# Altium footprint library Amin-Library.PcbLib: 601 footprints (part 30 of 38)
Each footprint in its own frame and in the unit in brackets; x right, y up, seen from the top. Pads: shape width x height; smd on the part's side, far side on the other; paste and mask are expansions set on the pad; w line width, h text height; cw(c..) or ccw(c..) is an arc to the next point about the centre after c.
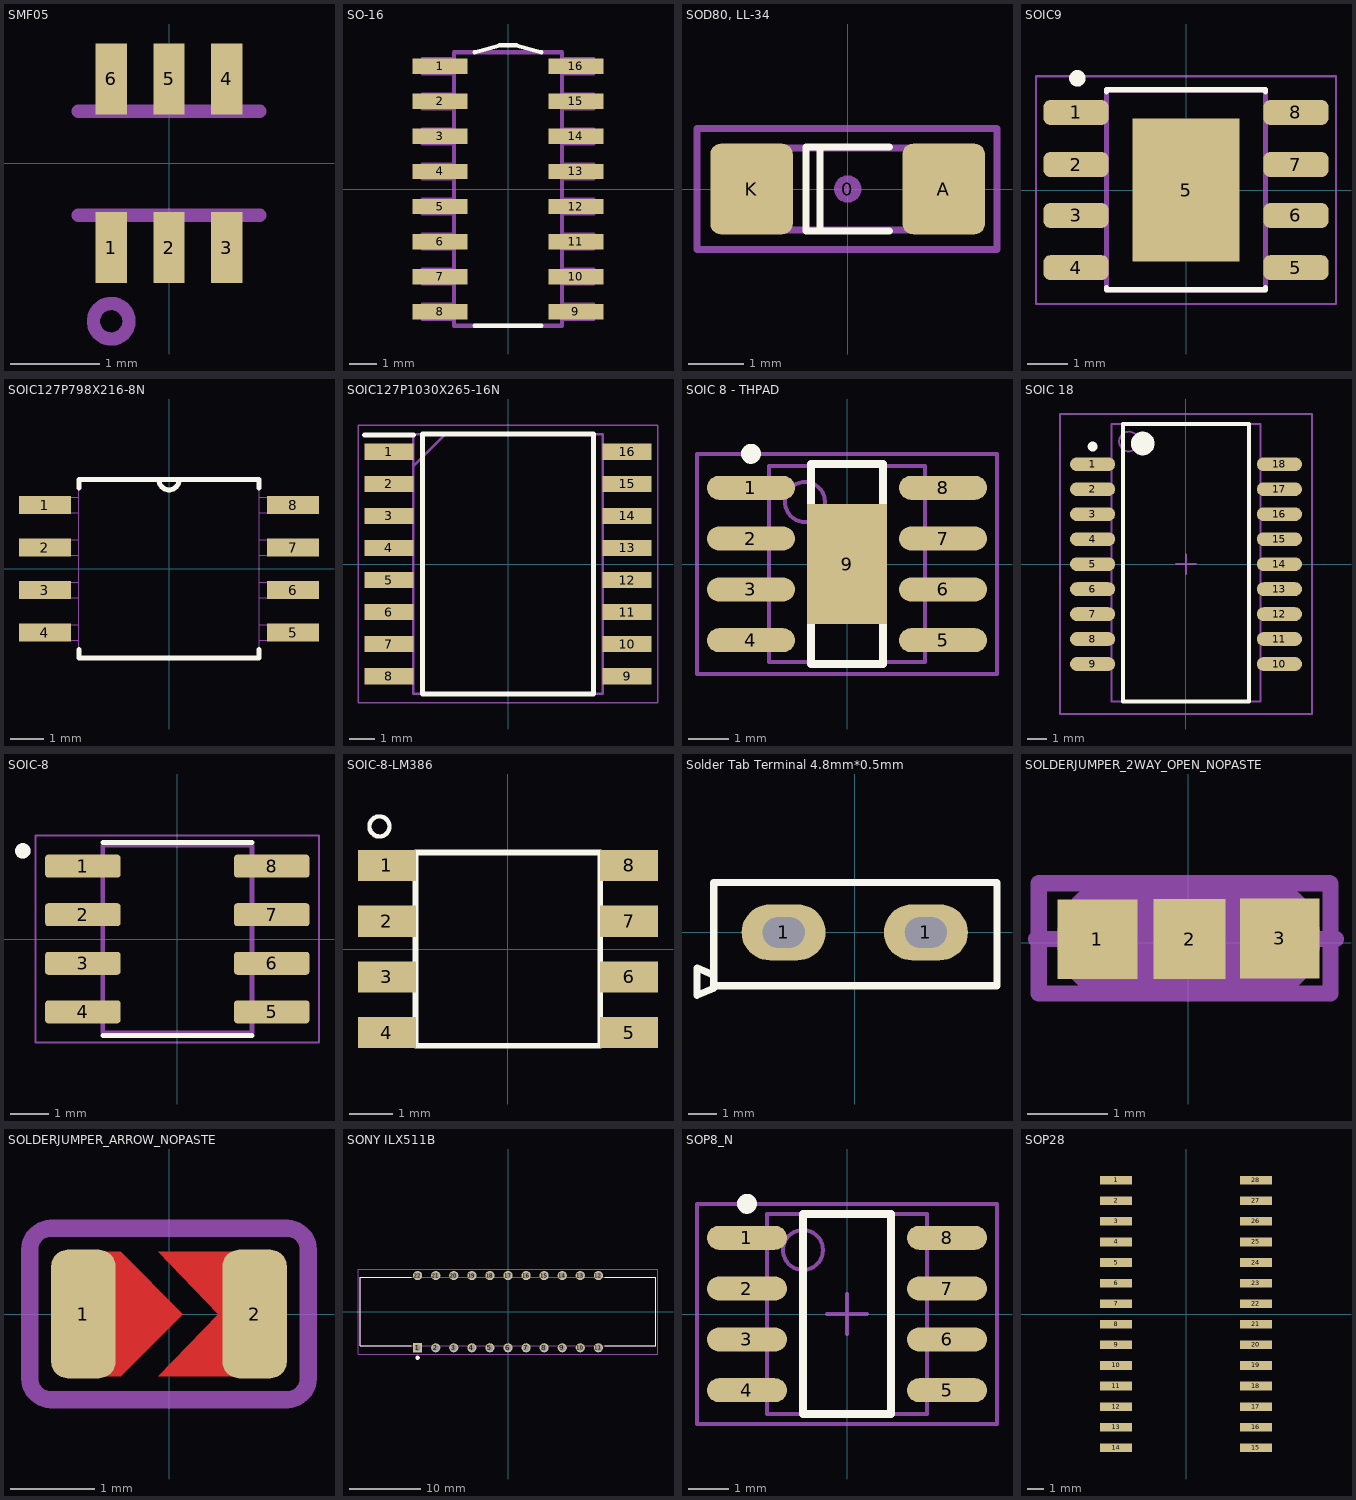
[diagram p29: the footprints below, top view; thin cyan lines are the x and y axes]

## SMF05 [mm]
pads (6):
  rect 0.35x0.8 smd: 1(-0.65,-0.95) 2(0,-0.95) 3(0.65,-0.95) 4(0.65,0.95) 5(0,0.95) 6(-0.65,0.95)
Top Paste:
  region: -0.802,1.325 -0.5,1.325 -0.5,0.576 -0.802,0.576
  region: -0.15,1.325 0.15,1.325 0.15,0.575 -0.15,0.575
  region: 0.5,1.325 0.8,1.325 0.8,0.575 0.5,0.575
  region: 0.5,-0.575 0.8,-0.575 0.8,-1.326 0.5,-1.326
  region: -0.15,-0.575 0.15,-0.575 0.15,-1.326 -0.15,-1.326
  region: -0.801,-0.575 -0.5,-0.575 -0.5,-1.326 -0.801,-1.326
Top Solder:
  region: -0.875,1.4 -0.425,1.4 -0.425,0.5 -0.875,0.5
  region: -0.225,1.4 0.225,1.4 0.225,0.501 -0.225,0.501
  region: 0.425,1.4 0.875,1.4 0.875,0.5 0.425,0.5
  region: 0.426,-0.5 0.875,-0.5 0.875,-1.402 0.426,-1.402
  region: -0.225,-0.5 0.225,-0.5 0.225,-1.401 -0.225,-1.401
  region: -0.875,-0.5 -0.425,-0.5 -0.425,-1.401 -0.875,-1.401
Mechanical 3:
  circle w0.15: c-0.651,-1.778 r0.2
Mechanical 4:
  region: -0.801,1.2 -0.5,1.2 -0.5,0.626 -0.801,0.626
  region: -0.15,1.2 0.15,1.2 0.15,0.626 -0.15,0.626
  region: 0.501,1.2 0.8,1.2 0.8,0.626 0.501,0.626
  region: 0.5,-0.625 0.8,-0.625 0.8,-1.201 0.5,-1.201
  region: -0.801,-0.625 -0.5,-0.625 -0.5,-1.202 -0.801,-1.202
  region: -0.15,-0.625 0.15,-0.625 0.15,-1.2 -0.15,-1.2
  region: -0.801,1.2 -0.5,1.2 -0.5,0.626 -0.801,0.626
  region: -0.15,1.2 0.15,1.2 0.15,0.626 -0.15,0.626
  region: 0.501,1.2 0.8,1.2 0.8,0.626 0.501,0.626
  region: 0.5,-0.625 0.8,-0.625 0.8,-1.201 0.5,-1.201
  region: -0.801,-0.625 -0.5,-0.625 -0.5,-1.202 -0.801,-1.202
  region: -0.15,-0.625 0.15,-0.625 0.15,-1.2 -0.15,-1.2
  lines w0.152: -1.022,-0.585 1.022,-0.585 -1.022,-0.585 ; -1.022,0.585 1.022,0.585 -1.022,0.585
3D body "User Library-SOT363-2.step": height 1.1, standoff 0, extent -1.1,-1.2 1.1,1.2

## SO-16 [mil]
height 629.92
pads (16):
  rect 78x22 smd: 1(-97,175) 2(-97,125) 3(-97,75) 4(-97,25) 5(-97,-25) 6(-97,-75) 7(-97,-125) 8(-97,-175) 9(97,-175) 10(97,-125) 11(97,-75) 12(97,-25) 13(97,25) 14(97,75) 15(97,125) 16(97,175)
Top Overlay:
  lines w6: -48,-195 48,-195 ; -48,195 -12,205 12,205 48,195
Mechanical 13:
  lines w6: -122,-185 -77,-185 -77,-165 -122,-165 -122,-185 ; -122,-135 -77,-135 -77,-115 -122,-115 -122,-135 ; -122,-85 -77,-85 -77,-65 -122,-65 -122,-85 ; -122,-35 -77,-35 -77,-15 -122,-15 -122,-35 ; -122,15 -77,15 -77,35 -122,35 -122,15 ; -122,65 -77,65 -77,85 -122,85 -122,65 ; -122,115 -77,115 -77,135 -122,135 -122,115 ; -122,165 -77,165 -77,185 -122,185 -122,165 ; -77,-195 -77,195 -12,195 12,195 77,195 77,-195 -77,-195 ; 77,-185 122,-185 122,-165 77,-165 77,-185 ; 77,-135 122,-135 122,-115 77,-115 77,-135 ; 77,-85 122,-85 122,-65 77,-65 77,-85 ; 77,-35 122,-35 122,-15 77,-15 77,-35 ; 77,15 122,15 122,35 77,35 77,15 ; 77,65 122,65 122,85 77,85 77,65 ; 77,115 122,115 122,135 77,135 77,115 ; 77,165 122,165 122,185 77,185 77,165

## SOD80, LL-34 [mm] "Diode, MiniMELF"
height 1.6
pads (3):
  round 0.5 on Mech15: 0(0,0)
  rrect25% 1.5x1.65 smd paste+0.2: A(1.75,0) K(-1.75,0)
Top Overlay:
  lines w0.127: -0.508,-0.762 -0.508,0.762 ; 0.762,-0.762 -0.762,-0.762 -0.762,0.762 0.762,0.762
Mechanical 13:
  lines w0.127: -1.8,-0.747 -1.8,0.747 1.8,0.747 1.8,-0.747 -1.8,-0.747
Mechanical 15:
  lines w0.127: -2.743,-1.1 -2.743,1.1 2.718,1.1 2.718,-1.1 -2.743,-1.1
3D body "SOD80.stp": height 1.47, standoff -0.01, extent -1.8,-0.747 1.8,0.747

## SOIC9 [mm]
pads (9):
  rrect54% 1.6x0.61 smd: 1(-2.7,1.905) 2(-2.7,0.625) 3(-2.7,-0.625) 4(-2.7,-1.905) 5(2.7,-1.905) 6(2.7,-0.625) 7(2.7,0.625) 8(2.7,1.905)
  rect 2.62x3.51 smd: 5(0,0)
Top Overlay:
  circle w0.203: c-2.667,2.743 r0.102
  lines w0.127: -1.95,-2.4 -1.95,-2.45 1.956,-2.45 1.956,-2.4 ; -1.95,2.413 -1.95,2.464 1.956,2.464 1.956,2.413
Top Paste:
  rectangle: 0.152,0.152 0.94,1.397
  rectangle: 0.152,-1.375 0.94,-0.135
  region: -0.135,-0.135 -0.935,-0.135 -0.935,-1.375 -0.135,-1.375
  region: -0.135,1.397 -0.935,1.397 -0.935,0.152 -0.135,0.152
Mechanical 4:
Mechanical 16:
  lines w0.127: -1.95,-2.45 1.956,-2.45 1.956,2.464 -1.95,2.464 -1.95,-2.45
Mechanical 27:
  lines w0.051: -3.683,-2.794 3.683,-2.794 3.683,2.794 -3.683,2.794 -3.683,-2.794

## SOIC127P798X216-8N [mil]
pads (8):
  rect 61x21 smd: 1(-146,75) 2(-146,25) 3(-146,-25) 4(-146,-75) 5(146,-75) 6(146,-25) 7(146,25) 8(146,75)
Top Overlay:
  lines w6: -106,-95 -106,-105 106,-105 106,-95 ; -106,95 -106,105 -12,105 ; 106,95 106,105 12,105 ; -12,105 ccw(c0,105) 12,105 ; -12,105 ccw(c0,105) 12,105 ; -12,105 12,105
Top Assembly:
Mechanical 16:
  lines w0: -12,105 ccw(c0,105) 12,105 ; -12,105 ccw(c0,105) 12,105 ; -12,105 -106,105 -106,-105 106,-105 106,105 12,105 ; -12,105 12,105 ; -163,-84 -106,-84 -106,-66 -163,-66 -163,-84 ; -163,-34 -106,-34 -106,-16 -163,-16 -163,-34 ; -163,16 -106,16 -106,34 -163,34 -163,16 ; -163,66 -106,66 -106,84 -163,84 -163,66 ; 106,-84 163,-84 163,-66 106,-66 106,-84 ; 106,-34 163,-34 163,-16 106,-16 106,-34 ; 106,16 163,16 163,34 106,34 106,16 ; 106,66 163,66 163,84 106,84 106,66

## SOIC127P1030X265-16N [mm]
pads (16):
  rect 1.95x0.65 smd: 1(-4.725,4.445) 2(-4.725,3.175) 3(-4.725,1.905) 4(-4.725,0.635) 5(-4.725,-0.635) 6(-4.725,-1.905) 7(-4.725,-3.175) 8(-4.725,-4.445) 9(4.725,-4.445) 10(4.725,-3.175) 11(4.725,-1.905) 12(4.725,-0.635) 13(4.725,0.635) 14(4.725,1.905) 15(4.725,3.175) 16(4.725,4.445)
Top Overlay:
  lines w0.2: -5.7,5.12 -3.75,5.12 ; -3.4,-5.15 3.4,-5.15 3.4,5.15 -3.4,5.15 -3.4,-5.15
Mechanical 15:
  lines w0.1: -3.75,3.88 -2.48,5.15 ; -3.75,-5.15 3.75,-5.15 3.75,5.15 -3.75,5.15 -3.75,-5.15
Mechanical 20:
  lines w0.05: -5.95,-5.5 5.95,-5.5 5.95,5.5 -5.95,5.5 -5.95,-5.5
3D body "SOIC-16.stp": height 2.59, standoff 0, extent -5.167,-5.15 5.168,5.15

## SOIC 8 - THPAD [mm] "8-Pin Small Outline Integrated Circuit 1.27 mm Pitch, IPC Medium Density"
height 1.73
pads (9):
  oval 2.2x0.6 smd: 1(-2.4,1.905) 2(-2.4,0.635) 3(-2.4,-0.635) 4(-2.4,-1.905) 5(2.4,-1.905) 6(2.4,-0.635) 7(2.4,0.635) 8(2.4,1.905)
  rect 2x3 smd: 9(0,0)
Top Overlay:
  circle w0.25: c-2.4,2.755 r0.125
  lines w0.2: -0.9,-2.5 0.9,-2.5 0.9,2.5 -0.9,2.5 -0.9,-2.5
Mechanical 13:
  circle w0.1: c-1.05,1.55 r0.5
  lines w0.1: -1.95,-2.45 1.95,-2.45 1.95,2.45 -1.95,2.45 -1.95,-2.45
Mechanical 15:
  lines w0.1: -0.5,0 0.5,0 ; 0,-0.5 0,0.5 ; -3.75,-2.75 3.75,-2.75 3.75,2.75 -3.75,2.75 -3.75,-2.75
3D body: height 1.73, standoff 0, extent -1.95,-2.45 1.95,2.45

## SOIC 18 [mm] "16-Pin Small Outline Integrated Circuit 1.27 mm Pitch, IPC Low Density"
height 2.68
pads (18):
  oval 2.3x0.7 smd: 1(-4.75,5.08) 2(-4.75,3.81) 3(-4.75,2.54) 4(-4.75,1.27) 5(-4.75,0) 6(-4.75,-1.27) 7(-4.75,-2.54) 8(-4.75,-3.81) 9(-4.75,-5.08) 10(4.75,-5.08) 11(4.75,-3.81) 12(4.75,-2.54) 13(4.75,-1.27) 14(4.75,0) 15(4.75,1.27) 16(4.75,2.54) 17(4.75,3.81) 18(4.75,5.08)
Top Overlay:
  circle w0.25: c-4.75,5.98 r0.125
  circle w0.6: c-2.2,6.135 r0.3
  lines w0.2: -3.2,-6.985 -3.2,7.135 3.2,7.135 3.2,-6.985 -3.2,-6.985
Mechanical 13:
  circle w0.1: c-2.9,6.235 r0.5
  lines w0.1: -3.8,-6.985 -3.8,7.135 3.8,7.135 3.8,-6.985 -3.8,-6.985
Mechanical 15:
  lines w0.1: -0.5,0 0.5,0 ; 0,-0.5 0,0.5 ; -6.4,-7.62 -6.4,7.635 6.4,7.635 6.4,-7.62 -6.4,-7.62
3D body: height 2.68, standoff 0, extent -3.8,-6.985 3.8,7.135

## SOIC-8 [mm]
pads (8):
  rrect25% 1.97x0.6 smd: 1(-2.47,1.905) 2(-2.47,0.635) 3(-2.47,-0.635) 4(-2.47,-1.905) 5(2.47,-1.905) 6(2.47,-0.635) 7(2.47,0.635) 8(2.47,1.905)
Top Overlay:
  circle w0.2: c-4.04,2.305 r0.1
  lines w0.127: -1.95,-2.525 1.95,-2.525 ; -1.95,2.525 1.95,2.525
Mechanical 13:
  circle w0.2: c-4.04,2.305 r0.1
  lines w0.127: -1.95,-2.452 1.95,-2.452 1.95,2.452 -1.95,2.452 -1.95,-2.452
Mechanical 15:
  lines w0.05: -3.705,-2.702 3.705,-2.702 3.705,2.702 -3.705,2.702 -3.705,-2.702
3D body "step_temp.STEP": height 1.75, standoff 0, extent -2.997,-2.451 2.997,2.451

## SOIC-8-LM386 [mil]
pads (8):
  rect 52x28 smd: 1(-108.27,75) 2(-108.27,25) 3(-108.27,-25) 4(-108.27,-75) 5(109,-75) 6(109,-25) 7(109,25) 8(109,75)
Top Overlay:
  circle w3.94: c-115,110 r9
  lines w5: -82.68,-87 83,-87 83,86.61 -82.68,86.61 -82.68,-87

## Solder Tab Terminal 4.8mm*0.5mm [mm] "2Pin"
height 18
pads (2):
  oval 3x2 hole 1.1 slot 1.5 at 0 deg: 1(-2.54,0) 1(2.54,0)
Top Overlay:
  lines w0.254: -5.129,-1.486 -5.634,-1.267 -5.634,-2.248 -5.034,-1.988 -5.034,1.778 5.08,1.778 5.08,-1.905 -5.034,-1.905
3D body "726388-2.stp": height 8.6, standoff -5.2, extent -3.2,-0.254 3.2,0.246

## SOLDERJUMPER_2WAY_OPEN_NOPASTE [mm] "SOLDERJUMPER_2WAY_OPEN_NOPASTE"
pads (3):
  rect 1x1 smd paste+0 mask+0: 1(-1.141,0.045) 3(1.143,0.055)
  rect 0.9x1 smd paste+0 mask+0: 2(0.014,0.048)
Top Solder:
  region: -1.81,-0.519 -1.81,0.629 1.729,0.629 1.729,-0.519
Mechanical 3:
  region: -0.506,-0.714 -0.506,0.81 0.51,0.81 0.51,-0.714
  lines w0.203: -1.91,0.048 -1.649,0.048 ; 1.653,0.048 1.848,0.048
  lines w1.27: -0.887,-0.079 cw(c-0.887,0.048) -0.887,0.175 ; 0.891,-0.079 ccw(c0.891,0.048) 0.891,0.175
Bottom Courtyard:
  lines w0.203: 1.765,-0.635 -1.875,-0.635 -1.875,0.746 1.765,0.746 ; 1.778,-0.635 1.778,0.74
3D body: height 1.27, standoff 0, extent -1.649,-0.469 -0.578,0.558

## SOLDERJUMPER_ARROW_NOPASTE [mil] "SOLDERJUMPER_ARROW_NOPASTE"
pads (2):
  rrect50% 30x60 smd paste+0 mask+0: 1(-40,0) 2(40,0)
Top Layer:
  region: -45,29 -22.5,29 6.5,0 -22.5,-29 -45,-29
  region: -5,29 23,0 -5,-29 45,-29 45,29
Top Solder:
  region: -57.5,-32.5 -57.5,32.5 57.5,32.5 57.5,-32.5
Bottom Courtyard:
  lines w8: -65,-30 ccw(c-55,-30) -55,-40 55,-40 ccw(c55,-30) 65,-30 65,30 ccw(c55,30) 55,40 -55,40 ccw(c-55,30) -65,30 -65,-30
3D body: height 150, standoff 0, extent -57.5,-32.5 57.5,32.5
3D body: height 150, standoff 0, extent -45,-29 6.5,29
3D body: height 150, standoff 0, extent -5,-29 45,29
3D body: height 50, standoff 0, extent -55.15,-30.15 -24.85,30.15
3D body: height 50, standoff 0, extent 24.85,-30.15 55.15,30.15

## SONY ILX511B [mm] "2048-pixel CCD Linear Sensor"
height 8
pads (22):
  rect 1.29x1.29 hole 0.86: 1(-12.7,-5.08)
  round 1.29 hole 0.86: 2(-10.16,-5.08) 3(-7.62,-5.08) 4(-5.08,-5.08) 5(-2.54,-5.08) 6(0,-5.08) 7(2.54,-5.08) 8(5.08,-5.08) 9(7.62,-5.08) 10(10.16,-5.08) 11(12.7,-5.08) 12(12.7,5.08) 13(10.16,5.08) 14(7.62,5.08) 15(5.08,5.08) 16(2.54,5.08) 17(0,5.08) 18(-2.54,5.08) 19(-5.08,5.08) 20(-7.62,5.08) 21(-10.16,5.08) 22(-12.7,5.08)
Top Overlay:
  circle w0.3: c-12.7,-6.477 r0.15
  lines w0.127: -13.589,-4.826 -20.8,-4.826 -20.8,4.826 -13.589,4.826 ; 13.589,-4.826 20.8,-4.826 20.8,4.826 13.589,4.826
Mechanical 4:
  lines w0.127: -20.8,-4.826 20.8,-4.826 ; -20.8,-4.826 -20.8,4.826 ; -20.8,-4.826 20.8,-4.826 ; -20.8,-4.826 -20.8,4.826 ; -20.8,4.826 20.8,4.826 ; -20.8,4.826 20.8,4.826 ; 20.8,-4.826 20.8,4.826 ; 20.8,-4.826 20.8,4.826
Mechanical 16:
  lines w0.05: -21.082,-5.969 21.082,-5.969 21.082,5.969 -21.082,5.969 -21.082,-5.969
3D body "User Library-TCD1304.step": height 3.22, standoff -4.01, extent -20.8,-5.507 20.8,5.253

## SOP8_N [mm] "SOIC, 8-Leads, Body 4.9x3.9mm, Pitch 1.27mm, IPC Medium Density"
height 1.75
pads (8):
  oval 2x0.6 smd: 1(-2.5,1.905) 2(-2.5,0.635) 3(-2.5,-0.635) 4(-2.5,-1.905) 5(2.5,-1.905) 6(2.5,-0.635) 7(2.5,0.635) 8(2.5,1.905)
Top Overlay:
  circle w0.25: c-2.5,2.755 r0.125
  lines w0.2: -1.1,-2.5 -1.1,2.5 1.1,2.5 1.1,-2.5 -1.1,-2.5
Mechanical 13:
  circle w0.1: c-1.1,1.6 r0.5
  lines w0.1: -2,-2.5 -2,2.5 2,2.5 2,-2.5 -2,-2.5
Mechanical 15:
  lines w0.1: -0.5,0 0.5,0 ; 0,-0.5 0,0.5 ; -3.75,-2.75 -3.75,2.75 3.75,2.75 3.75,-2.75 -3.75,-2.75
3D body: height 1.75, standoff 0, extent -2,-2.5 2,2.5

## SOP28 [mil]
pads (28):
  rect 78.74x21 smd: 1(-170,325) 2(-170,275) 3(-170,225) 4(-170,175) 5(-170,125) 6(-170,75) 7(-170,25) 8(-170,-25) 9(-170,-75) 10(-170,-125) 11(-170,-175) 12(-170,-225) 13(-170,-275) 14(-170,-325) 15(170,-325) 16(170,-275) 17(170,-225) 18(170,-175) 19(170,-125) 20(170,-75) 21(170,-25) 22(170,25) 23(170,75) 24(170,125) 25(170,175) 26(170,225) 27(170,275) 28(170,325)